# Altium footprint library TEL0124.PcbLib: 1 footprints
Each footprint in its own frame and in the unit in brackets; x right, y up, seen from the top. Pads: shape width x height; smd on the part's side, far side on the other; paste and mask are expansions set on the pad; w line width, h text height; cw(c..) or ccw(c..) is an arc to the next point about the centre after c.
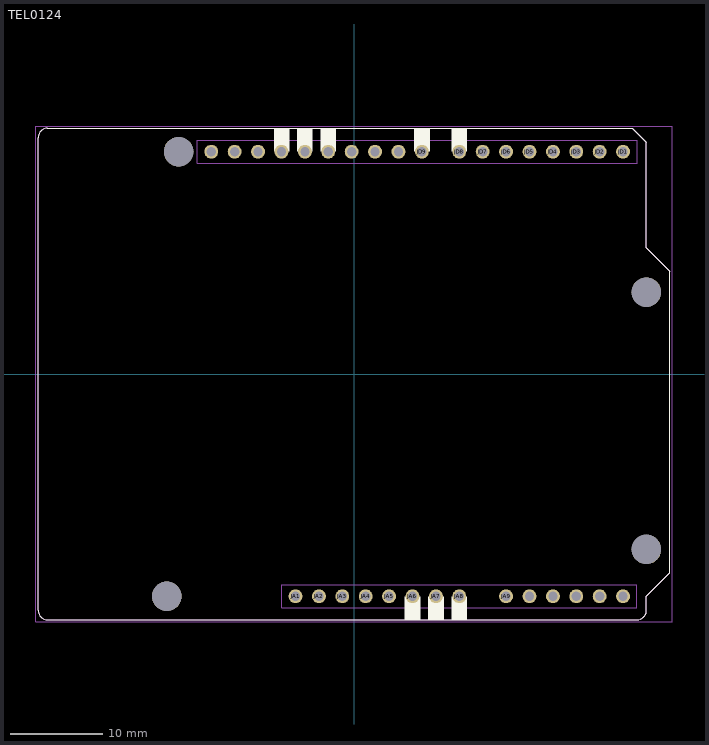
[diagram p0: the footprint, top view; thin cyan lines are the x and y axes]

## TEL0124 [mm] "TEL0124"
pads (36):
  round 1.508 hole 1: JA1(-6.35,-24.13) JA2(-3.81,-24.13) JA3(-1.27,-24.13) JA4(1.27,-24.13) JA5(3.81,-24.13) JA6(6.35,-24.13) JA7(8.89,-24.13) JA8(11.43,-24.13) JA9(16.51,-24.13) JA10(19.05,-24.13) JA11(21.59,-24.13) JA12(24.13,-24.13) JA13(26.67,-24.13) JA14(29.21,-24.13) JD1(29.21,24.13) JD2(26.67,24.13) JD3(24.13,24.13) JD4(21.59,24.13) JD5(19.05,24.13) JD6(16.51,24.13) JD7(13.97,24.13) JD8(11.43,24.13) JD9(7.366,24.13) JD10(4.826,24.13) JD11(2.286,24.13) JD12(-0.254,24.13) JD13(-2.794,24.13) JD14(-5.334,24.13) JD15(-7.874,24.13) JD16(-10.414,24.13) JD17(-12.954,24.13) JD18(-15.494,24.13)
  round 3.2 hole 3.2 unplated: ""(-20.32,-24.13) ""(-19.05,24.13) ""(31.75,-19.05) ""(31.75,8.89)
Top Overlay:
  rectangle: 10.577,24.13 12.29,26.629
  rectangle: 6.513,24.13 8.226,26.629
  rectangle: -8.698,24.171 -6.985,26.67
  rectangle: 10.574,-26.628 12.286,-24.129
  rectangle: 8.032,-26.628 9.744,-24.129
  rectangle: 5.497,-26.628 7.21,-24.129
  rectangle: -6.194,24.171 -4.481,26.67
  rectangle: -3.655,24.171 -1.943,26.67
  lines w0.127: -34.29,-25.67 ccw(c-33.29,-25.67) -33.29,-26.67 30.75,-26.67 ccw(c30.75,-25.67) 31.75,-25.67 31.75,-24.13 34.29,-21.59 34.29,11.176 31.75,13.716 31.75,25.146 30.226,26.67 -33.29,26.67 ccw(c-33.29,25.67) -34.29,25.67 -34.29,-25.67
Mechanical 13:
  lines w0.127: -34.29,-25.67 ccw(c-33.29,-25.67) -33.29,-26.67 30.75,-26.67 ccw(c30.75,-25.67) 31.75,-25.67 31.75,-24.13 34.29,-21.59 34.29,11.176 31.75,13.716 31.75,25.146 30.226,26.67 -33.29,26.67 ccw(c-33.29,25.67) -34.29,25.67 -34.29,-25.67 ; -17.011,22.872 -17.011,25.378 30.732,25.378 30.732,22.872 -17.011,22.872 ; -7.831,-25.4 -7.831,-22.86 30.691,-22.86 30.691,-25.4 -7.831,-25.4
Mechanical 15:
  lines w0.05: -34.54,-26.92 34.54,-26.92 34.54,26.92 -34.54,26.92 -34.54,-26.92
3D body "TEL0124-1.STEP": height 10.11, standoff -1.59, extent -35.152,-26.67 34.29,26.67